# Altium footprint library SHDR4W60P200X200_2X2_1110X730X870P.PcbLib: 1 footprints
Each footprint in its own frame and in the unit in brackets; x right, y up, seen from the top. Pads: shape width x height; smd on the part's side, far side on the other; paste and mask are expansions set on the pad; w line width, h text height; cw(c..) or ccw(c..) is an arc to the next point about the centre after c.
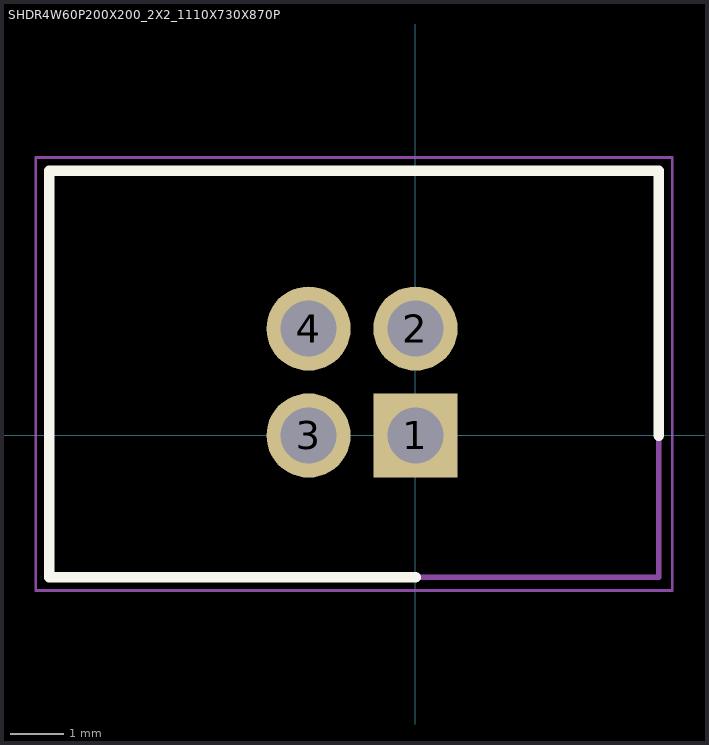
[diagram p0: the footprint, top view; thin cyan lines are the x and y axes]

## SHDR4W60P200X200_2X2_1110X730X870P [mm]
pads (4):
  rect 1.575x1.575 / inner round 1.575 / far side rect 1.575x1.575 hole 1.05: 1(0,0)
  round 1.575 hole 1.05: 2(0,2) 3(-2,0) 4(-2,2)
Top Overlay:
  lines w0.2: 0,-2.65 -6.85,-2.65 -6.85,4.95 4.55,4.95 4.55,0
Mechanical 15:
  lines w0.1: -6.85,-2.65 4.55,-2.65 4.55,4.95 -6.85,4.95 -6.85,-2.65
Mechanical 20:
  lines w0.05: -7.1,-2.9 4.8,-2.9 4.8,5.2 -7.1,5.2 -7.1,-2.9